# EAGLE library part TRANSISTOR-BJT_DMMT3906W (library dp_devices.v6)
Matched pair PNP small signal transistor -40V -200mA
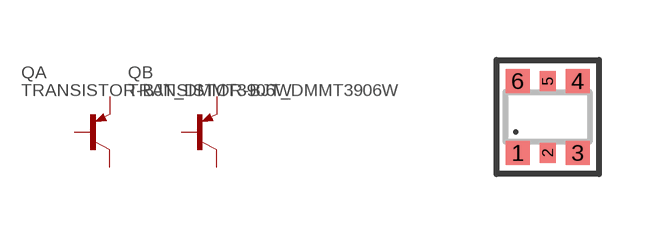
[diagram p205: symbol with the pads of SOT-363; footprint SOT-363]

Designator prefix Q; gates A=PNP B=PNP

## TRANSISTOR-BJT_DMMT3906W  [SOT-363]
1  B:B  pas
2  A:B  pas
3  A:C  pas
4  A:E  pas
5  B:E  pas
6  B:C  pas

## Footprint SOT-363 (pad centres in mm)
smd 0.6 x 0.6: 1 -0.75,-0.9; 3 0.75,-0.9; 4 0.75,0.9; 6 -0.75,0.9
smd 0.4 x 0.5: 2 0,-0.9; 5 0,0.9